# Altium footprint library FootPrintLib_1.PcbLib: 498 footprints (part 3 of 35)
Each footprint in its own frame and in the unit in brackets; x right, y up, seen from the top. Pads: shape width x height; smd on the part's side, far side on the other; paste and mask are expansions set on the pad; w line width, h text height; cw(c..) or ccw(c..) is an arc to the next point about the centre after c.
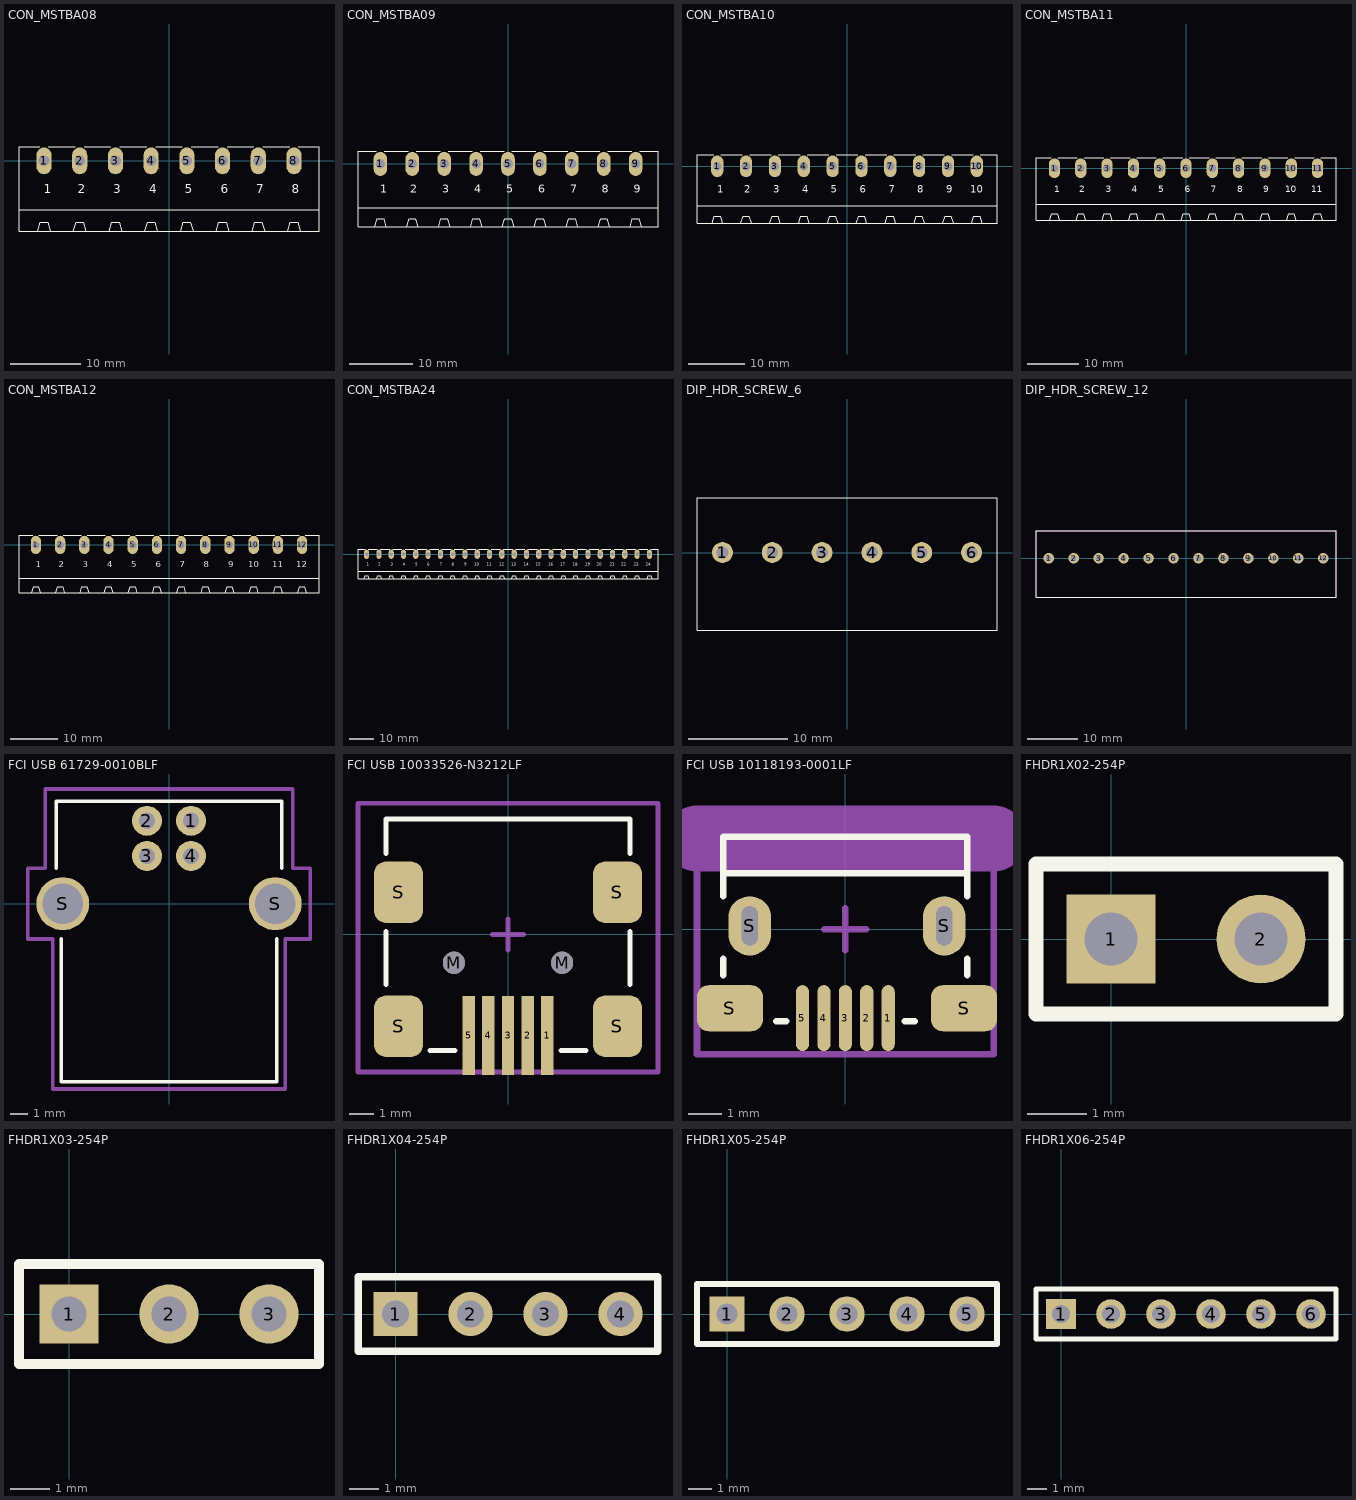
[diagram p2: the footprints below, top view; thin cyan lines are the x and y axes]

## CON_MSTBA08 [mil]
height 338.58
pads (8):
  oval 85x150 hole 60: 1(-700,0) 2(-500,0) 3(-300,0) 4(-100,0) 5(100,0) 6(300,0) 7(500,0) 8(700,0)
Top Overlay:
  lines w6: -725,80 -840,80 -840,-275 ; -675,80 -525,80 ; -475,80 -325,80 ; -275,80 -125,80 ; -75,80 75,80 ; 125,80 275,80 ; 325,80 475,80 ; 525,80 675,80 ; 725,80 840,80 840,-275 ; -840,-275 840,-275 ; -840,-275 -840,-395 -735,-395 ; -735,-395 -720,-345 -680,-345 -665,-395 ; -735,-395 -665,-395 ; -665,-395 -535,-395 ; -535,-395 -520,-345 -480,-345 -465,-395 ; -535,-395 -465,-395 ; -465,-395 -335,-395 ; -335,-395 -265,-395 ; -335,-395 -320,-345 -280,-345 -265,-395 ; -265,-395 -135,-395 ; -135,-395 -65,-395 ; -135,-395 -120,-345 -80,-345 -65,-395 ; -65,-395 65,-395 ; 65,-395 135,-395 ; 65,-395 80,-345 120,-345 135,-395 ; 135,-395 265,-395 ; 265,-395 335,-395 ; 265,-395 280,-345 320,-345 335,-395 ; 335,-395 465,-395 ; 465,-395 535,-395 ; 465,-395 480,-345 520,-345 535,-395 ; 535,-395 665,-395 ; 665,-395 735,-395 ; 665,-395 680,-345 720,-345 735,-395 ; 735,-395 840,-395 840,-275
  text "1" at -701.26,-182.48 h50
  text "2" at -511.26,-182.48 h50
  text "3" at -311.26,-182.48 h50
  text "4" at -111.26,-182.48 h50
  text "5" at 88.74,-182.48 h50
  text "6" at 288.74,-182.48 h50
  text "7" at 488.74,-182.48 h50
  text "8" at 688.74,-182.48 h50
3D body "MSTBA2.stp": height 339.58, standoff -136.8, extent -840,-392.44 -361.26,80.09
3D body "MSTBA3.stp": height 339.58, standoff -136.8, extent -440,-392.44 238.74,80.09
3D body "MSTBA3.stp": height 339.58, standoff -136.8, extent 160,-392.44 838.74,80.09

## CON_MSTBA09 [mil]
height 338.58
pads (9):
  oval 85x150 hole 60: 1(-800,0) 2(-600,0) 3(-400,0) 4(-200,0) 5(0,0) 6(200,0) 7(400,0) 8(600,0) 9(800,0)
Top Overlay:
  lines w6: -825,80 -940,80 -940,-275 ; -775,80 -625,80 ; -575,80 -425,80 ; -375,80 -225,80 ; -175,80 -25,80 ; 25,80 175,80 ; 225,80 375,80 ; 425,80 575,80 ; 625,80 775,80 ; 825,80 940,80 940,-275 ; -940,-275 940,-275 ; -940,-275 -940,-395 -835,-395 ; -835,-395 -820,-345 -780,-345 -765,-395 ; -835,-395 -765,-395 ; -765,-395 -635,-395 ; -635,-395 -620,-345 -580,-345 -565,-395 ; -635,-395 -565,-395 ; -565,-395 -435,-395 ; -435,-395 -365,-395 ; -435,-395 -420,-345 -380,-345 -365,-395 ; -365,-395 -235,-395 ; -235,-395 -165,-395 ; -235,-395 -220,-345 -180,-345 -165,-395 ; -165,-395 -35,-395 ; -35,-395 35,-395 ; -35,-395 -20,-345 20,-345 35,-395 ; 35,-395 165,-395 ; 165,-395 235,-395 ; 165,-395 180,-345 220,-345 235,-395 ; 235,-395 365,-395 ; 365,-395 435,-395 ; 365,-395 380,-345 420,-345 435,-395 ; 435,-395 565,-395 ; 565,-395 635,-395 ; 565,-395 580,-345 620,-345 635,-395 ; 635,-395 765,-395 ; 765,-395 835,-395 ; 765,-395 780,-345 820,-345 835,-395 ; 835,-395 940,-395 940,-275
  text "1" at -801.26,-182.48 h50
  text "2" at -611.26,-182.48 h50
  text "3" at -411.26,-182.48 h50
  text "4" at -211.26,-182.48 h50
  text "5" at -11.26,-182.48 h50
  text "6" at 188.74,-182.48 h50
  text "7" at 388.74,-182.48 h50
  text "8" at 588.74,-182.48 h50
  text "9" at 788.74,-182.48 h50
3D body "MSTBA3.stp": height 339.58, standoff -136.8, extent -940,-392.44 -261.26,80.09
3D body "MSTBA3.stp": height 339.58, standoff -136.8, extent -340,-392.44 338.74,80.09
3D body "MSTBA3.stp": height 339.58, standoff -136.8, extent 260,-392.44 938.74,80.09

## CON_MSTBA10 [mil]
height 338.58
pads (10):
  oval 85x150 hole 60: 1(-900,0) 2(-700,0) 3(-500,0) 4(-300,0) 5(-100,0) 6(100,0) 7(300,0) 8(500,0) 9(700,0) 10(900,0)
Top Overlay:
  lines w6: -925,80 -1040,80 -1040,-275 ; -875,80 -725,80 ; -675,80 -525,80 ; -475,80 -325,80 ; -275,80 -125,80 ; -75,80 75,80 ; 125,80 275,80 ; 325,80 475,80 ; 525,80 675,80 ; 725,80 875,80 ; 925,80 1040,80 1040,-275 ; -1040,-275 -1040,-395 -935,-395 ; -1040,-275 1040,-275 ; -935,-395 -865,-395 ; -935,-395 -920,-345 -880,-345 -865,-395 ; -865,-395 -735,-395 ; -735,-395 -665,-395 ; -735,-395 -720,-345 -680,-345 -665,-395 ; -665,-395 -535,-395 ; -535,-395 -520,-345 -480,-345 -465,-395 ; -535,-395 -465,-395 ; -465,-395 -335,-395 ; -335,-395 -320,-345 -280,-345 -265,-395 ; -335,-395 -265,-395 ; -265,-395 -135,-395 ; -135,-395 -120,-345 -80,-345 -65,-395 ; -135,-395 -65,-395 ; -65,-395 65,-395 ; 65,-395 80,-345 120,-345 135,-395 ; 65,-395 135,-395 ; 135,-395 265,-395 ; 265,-395 280,-345 320,-345 335,-395 ; 265,-395 335,-395 ; 335,-395 465,-395 ; 465,-395 480,-345 520,-345 535,-395 ; 465,-395 535,-395 ; 535,-395 665,-395 ; 665,-395 680,-345 720,-345 735,-395 ; 665,-395 735,-395 ; 735,-395 865,-395 ; 865,-395 880,-345 920,-345 935,-395 ; 865,-395 935,-395 ; 935,-395 1040,-395 1040,-275
  text "10" at 853.74,-182.48 h50
  text "9" at 688.74,-182.48 h50
  text "8" at 488.74,-182.48 h50
  text "7" at 288.74,-182.48 h50
  text "6" at 88.74,-182.48 h50
  text "5" at -111.26,-182.48 h50
  text "4" at -311.26,-182.48 h50
  text "3" at -511.26,-182.48 h50
  text "2" at -711.26,-182.48 h50
  text "1" at -901.26,-182.48 h50
3D body "MSTBA2.stp": height 339.58, standoff -136.8, extent -640,-392.44 -161.26,80.09
3D body "MSTBA2.stp": height 339.58, standoff -136.8, extent -1040,-392.44 -561.26,80.09
3D body "MSTBA3.stp": height 339.58, standoff -136.8, extent -240,-392.44 438.74,80.09
3D body "MSTBA3.stp": height 339.58, standoff -136.8, extent 360,-392.44 1038.74,80.09

## CON_MSTBA11 [mil]
height 338.58
pads (11):
  oval 85x150 hole 60: 1(-1000,0) 2(-800,0) 3(-600,0) 4(-400,0) 5(-200,0) 6(0,0) 7(200,0) 8(400,0) 9(600,0) 10(800,0) 11(1000,0)
Top Overlay:
  lines w6: -1025,80 -1140,80 -1140,-275 ; -975,80 -825,80 ; -775,80 -625,80 ; -575,80 -425,80 ; -375,80 -225,80 ; -175,80 -25,80 ; 25,80 175,80 ; 225,80 375,80 ; 425,80 575,80 ; 625,80 775,80 ; 825,80 975,80 ; 1025,80 1140,80 1140,-275 ; -1140,-275 -1140,-395 -1035,-395 ; -1140,-275 1140,-275 ; -1035,-395 -965,-395 ; -1035,-395 -1020,-345 -980,-345 -965,-395 ; -965,-395 -835,-395 ; -835,-395 -765,-395 ; -835,-395 -820,-345 -780,-345 -765,-395 ; -765,-395 -635,-395 ; -635,-395 -620,-345 -580,-345 -565,-395 ; -635,-395 -565,-395 ; -565,-395 -435,-395 ; -435,-395 -420,-345 -380,-345 -365,-395 ; -435,-395 -365,-395 ; -365,-395 -235,-395 ; -235,-395 -220,-345 -180,-345 -165,-395 ; -235,-395 -165,-395 ; -165,-395 -35,-395 ; -35,-395 -20,-345 20,-345 35,-395 ; -35,-395 35,-395 ; 35,-395 165,-395 ; 165,-395 180,-345 220,-345 235,-395 ; 165,-395 235,-395 ; 235,-395 365,-395 ; 365,-395 380,-345 420,-345 435,-395 ; 365,-395 435,-395 ; 435,-395 565,-395 ; 565,-395 580,-345 620,-345 635,-395 ; 565,-395 635,-395 ; 635,-395 765,-395 ; 765,-395 780,-345 820,-345 835,-395 ; 765,-395 835,-395 ; 835,-395 965,-395 ; 965,-395 980,-345 1020,-345 1035,-395 ; 965,-395 1035,-395 ; 1035,-395 1140,-395 1140,-275
  text "11" at 953.74,-182.48 h50
  text "10" at 753.74,-182.48 h50
  text "9" at 588.74,-182.48 h50
  text "8" at 388.74,-182.48 h50
  text "7" at 188.74,-182.48 h50
  text "6" at -11.26,-182.48 h50
  text "5" at -211.26,-182.48 h50
  text "4" at -411.26,-182.48 h50
  text "3" at -611.26,-182.48 h50
  text "2" at -811.26,-182.48 h50
  text "1" at -1001.26,-182.48 h50
3D body "MSTBA2.stp": height 339.58, standoff -136.8, extent -1140,-392.44 -661.26,80.09
3D body "MSTBA3.stp": height 339.58, standoff -136.8, extent -740,-392.44 -61.26,80.09
3D body "MSTBA3.stp": height 339.58, standoff -136.8, extent -140,-392.44 538.74,80.09
3D body "MSTBA3.stp": height 339.58, standoff -136.8, extent 460,-392.44 1138.74,80.09

## CON_MSTBA12 [mil]
height 338.58
pads (12):
  oval 85x150 hole 60: 1(-1100,0) 2(-900,0) 3(-700,0) 4(-500,0) 5(-300,0) 6(-100,0) 7(100,0) 8(300,0) 9(500,0) 10(700,0) 11(900,0) 12(1100,0)
Top Overlay:
  lines w6: -1125,80 -1240,80 -1240,-275 ; -1075,80 -925,80 ; -875,80 -725,80 ; -675,80 -525,80 ; -475,80 -325,80 ; -275,80 -125,80 ; -75,80 75,80 ; 125,80 275,80 ; 325,80 475,80 ; 525,80 675,80 ; 725,80 875,80 ; 925,80 1075,80 ; 1125,80 1240,80 1240,-275 ; -1240,-275 1240,-275 ; -1240,-275 -1240,-395 -1135,-395 ; -1135,-395 -1120,-345 -1080,-345 -1065,-395 ; -1135,-395 -1065,-395 ; -1065,-395 -935,-395 ; -935,-395 -920,-345 -880,-345 -865,-395 ; -935,-395 -865,-395 ; -865,-395 -735,-395 ; -735,-395 -665,-395 ; -735,-395 -720,-345 -680,-345 -665,-395 ; -665,-395 -535,-395 ; -535,-395 -465,-395 ; -535,-395 -520,-345 -480,-345 -465,-395 ; -465,-395 -335,-395 ; -335,-395 -265,-395 ; -335,-395 -320,-345 -280,-345 -265,-395 ; -265,-395 -135,-395 ; -135,-395 -65,-395 ; -135,-395 -120,-345 -80,-345 -65,-395 ; -65,-395 65,-395 ; 65,-395 135,-395 ; 65,-395 80,-345 120,-345 135,-395 ; 135,-395 265,-395 ; 265,-395 335,-395 ; 265,-395 280,-345 320,-345 335,-395 ; 335,-395 465,-395 ; 465,-395 535,-395 ; 465,-395 480,-345 520,-345 535,-395 ; 535,-395 665,-395 ; 665,-395 735,-395 ; 665,-395 680,-345 720,-345 735,-395 ; 735,-395 865,-395 ; 865,-395 935,-395 ; 865,-395 880,-345 920,-345 935,-395 ; 935,-395 1065,-395 ; 1065,-395 1135,-395 ; 1065,-395 1080,-345 1120,-345 1135,-395 ; 1135,-395 1240,-395 1240,-275
  text "1" at -1101.26,-182.48 h50
  text "2" at -911.26,-182.48 h50
  text "3" at -711.26,-182.48 h50
  text "4" at -511.26,-182.48 h50
  text "5" at -311.26,-182.48 h50
  text "6" at -111.26,-182.48 h50
  text "7" at 88.74,-182.48 h50
  text "8" at 288.74,-182.48 h50
  text "9" at 488.74,-182.48 h50
  text "10" at 653.74,-182.48 h50
  text "11" at 853.74,-182.48 h50
  text "12" at 1053.74,-182.48 h50
3D body "MSTBA3.stp": height 339.58, standoff -136.8, extent 560,-392.44 1238.74,80.09
3D body "MSTBA3.stp": height 339.58, standoff -136.8, extent -40,-392.44 638.74,80.09
3D body "MSTBA3.stp": height 339.58, standoff -136.8, extent -640,-392.44 38.74,80.09
3D body "MSTBA3.stp": height 339.58, standoff -136.8, extent -1240,-392.44 -561.26,80.09

## CON_MSTBA24 [mil]
height 338.58
pads (24):
  oval 85x150 hole 60: 1(-2300,0) 2(-2100,0) 3(-1900,0) 4(-1700,0) 5(-1500,0) 6(-1300,0) 7(-1100,0) 8(-900,0) 9(-700,0) 10(-500,0) 11(-300,0) 12(-100,0) 13(100,0) 14(300,0) 15(500,0) 16(700,0) 17(900,0) 18(1100,0) 19(1300,0) 20(1500,0) 21(1700,0) 22(1900,0) 23(2100,0) 24(2300,0)
Top Overlay:
  drawing of 151 lines, arcs and shapes, not listed
  text "1" at -2301.26,-182.48 h50
  text "2" at -2111.26,-182.48 h50
  text "3" at -1911.26,-182.48 h50
  text "4" at -1711.26,-182.48 h50
  text "5" at -1511.26,-182.48 h50
  text "6" at -1311.26,-182.48 h50
  text "7" at -1111.26,-182.48 h50
  text "8" at -911.26,-182.48 h50
  text "9" at -711.26,-182.48 h50
  text "10" at -546.26,-182.48 h50
  text "11" at -346.26,-182.48 h50
  text "12" at -146.26,-182.48 h50
  text "13" at 53.74,-182.48 h50
  text "14" at 253.74,-182.48 h50
  text "15" at 453.74,-182.48 h50
  text "16" at 653.74,-182.48 h50
  text "17" at 853.74,-182.48 h50
  text "18" at 1053.74,-182.48 h50
  text "19" at 1253.74,-182.48 h50
  text "20" at 1443.74,-182.48 h50
  text "21" at 1653.74,-182.48 h50
  text "22" at 1843.74,-182.48 h50
  text "23" at 2043.74,-182.48 h50
  text "24" at 2243.74,-182.48 h50
3D body "MSTBA 2,5 24-G-5,08 - 1757268.stp": height 339.58, standoff -136.8, extent -2440,-392.44 2438.74,80.09

## DIP_HDR_SCREW_6 [mm] "KMRJ103-5-508-6"
pads (6):
  round 2.1 hole 1.2: 1(-12.5,0) 2(-7.5,0) 3(-2.5,0) 4(2.5,0) 5(7.5,0) 6(12.5,0)
Top Overlay:
  lines w0.1: -15.05,-7.8 15.05,-7.8 15.05,5.5 -15.05,5.5 -15.05,-7.8
3D body "60s35.stp": height 15.3, standoff -3.5, extent -15.835,-6.404 14.906,6.996

## DIP_HDR_SCREW_12 [mm] "KMRJ103-5-508-12"
pads (12):
  round 2.1 hole 1.2: 1(-27.5,0) 2(-22.5,0) 3(-17.5,0) 4(-12.5,0) 5(-7.5,0) 6(-2.5,0) 7(2.5,0) 8(7.5,0) 9(12.5,0) 10(17.5,0) 11(22.5,0) 12(27.5,0)
Top Overlay:
  lines w0.1: -30.05,-7.8 -30.05,5.5 30.05,5.5 30.05,-7.8 -30.05,-7.8
Mechanical 13:
  lines w0.1: -30.05,-7.8 -30.05,5.5 30.05,5.5 30.05,-7.8 -30.05,-7.8
3D body "12pos35.stp": height 15.3, standoff -3.5, extent -30.701,-6.401 30.04,6.999

## FCI USB 61729-0010BLF [mm]
height 11
pads (6):
  round 1.7 hole 0.92: 1(1.25,4.7) 2(-1.25,4.7) 3(-1.25,2.71) 4(1.25,2.71)
  round 3 hole 2.3: S(-6.02,0) S(6.02,0)
Top Overlay:
  lines w0.2: -6.4,2 -6.4,5.8 6.4,5.8 6.4,2 ; -6.1,-2 -6.1,-10.1 6.1,-10.1 6.1,-2
Mechanical 15:
  lines w0.2: -8,-2 -8,2 -7,2 -7,6.5 0,6.5 7,6.5 7,2 8,2 8,-2 6.6,-2 6.6,-10.5 0,-10.5 -6.6,-10.5 -6.6,-2 -8,-2
3D body "FCI 61729-0010BLF.STEP": height 11, standoff -2.8, extent -6.56,-10.175 6.56,5.765

## FCI USB 10033526-N3212LF [mm] "USB 2.0 Type B Mini"
height 3.95
pads (11):
  rect 0.5x3.2 smd: 1(1.6,-4.1) 2(0.8,-4.1) 3(0,-4.1) 4(-0.8,-4.1) 5(-1.6,-4.1)
  round 0.9 hole 0.9 unplated: M(-2.2,-1.151) M(2.2,-1.151)
  rrect50% 2x2.5 smd: S(-4.45,-3.731) S(-4.45,1.719) S(4.45,-3.731) S(4.45,1.719)
Top Overlay:
  lines w0.2: -4.953,-2.04 -4.953,0.119 ; -4.953,3.294 -4.953,4.691 4.953,4.691 4.953,3.294 ; -3.175,-4.707 -2.159,-4.707 ; 2.159,-4.707 3.175,-4.707 ; 4.953,-2.04 4.953,0.119
Mechanical 15:
  lines w0.2: -0.635,0 0.635,0 ; 0,-0.635 0,0.635 ; -6.096,-5.588 -6.096,5.334 6.096,5.334 6.096,-5.588 -6.096,-5.588
3D body "FCI USB 10033526-N3212LF.STEP": height 4.01, standoff -0.99, extent -4.95,-4.701 4.95,4.699

## FCI USB 10118193-0001LF [mm] "USB 2.0 Type B Micro"
height 3.1
pads (9):
  oval 0.4x2 smd: 1(1.3,-2.7) 2(0.65,-2.7) 3(0,-2.7) 4(-0.65,-2.7) 5(-1.3,-2.7)
  rrect50% 2x1.4 smd: S(-3.5,-2.4) S(3.6,-2.4)
  oval 1.3x1.8 hole 0.5 slot 1.2 at 90 deg: S(-2.9,0.1) S(3,0.1)
Top Overlay:
  lines w0.2: -3.7,-1.4 -3.7,-0.9 ; -3.7,1 -3.7,1.7 ; -2.1,-2.8 -1.8,-2.8 ; 1.8,-2.8 2.1,-2.8 ; 3.7,-1.4 3.7,-0.9 ; 3.7,1 3.7,1.7 ; -3.7,1.7 3.7,1.7 ; -3.7,1.7 -3.7,2.8 3.7,2.8 3.7,1.7
Mechanical 15:
  lines w0.2: -0.635,0 0.635,0 ; 0,-0.635 0,0.635 ; -4.5,-3.8 -4.5,3.2 4.5,3.2 4.5,-3.8 -4.5,-3.8
Mechanical 31:
  lines w2: -4.5,2.754 0,2.754 4.5,2.754
3D body "FCI USB 10118193-0001lfc.STEP": height 2.78, standoff -0.82, extent -3.929,-2.9 3.928,2.76

## FHDR1X02-254P [mm] "Female Header 1X02 with 2.54 mm Pitch"
pads (2):
  rect 1.5x1.5 hole 0.9: 1(0,0)
  round 1.5 hole 0.9: 2(2.54,0)
Top Overlay:
  lines w0.254: -1.27,-1.27 -1.27,1.27 3.81,1.27 3.81,-1.27 -1.27,-1.27

## FHDR1X03-254P [mm] "Female Header 1X03 with 2.54 mm Pitch"
pads (3):
  rect 1.5x1.5 hole 0.9: 1(0,0)
  round 1.5 hole 0.9: 2(2.54,0) 3(5.08,0)
Top Overlay:
  lines w0.254: -1.27,-1.27 -1.27,1.27 6.35,1.27 6.35,-1.27 -1.27,-1.27

## FHDR1X04-254P [mm] "Female Header 1X04 with 2.54 mm Pitch"
pads (4):
  rect 1.5x1.5 hole 0.9: 1(0,0)
  round 1.5 hole 0.9: 2(2.54,0) 3(5.08,0) 4(7.62,0)
Top Overlay:
  lines w0.254: -1.27,-1.27 8.89,-1.27 8.89,1.27 -1.27,1.27 -1.27,-1.27

## FHDR1X05-254P [mm] "Female Header 1X05 with 2.54 mm Pitch"
pads (5):
  rect 1.5x1.5 hole 0.9: 1(0,0)
  round 1.5 hole 0.9: 2(2.54,0) 3(5.08,0) 4(7.62,0) 5(10.16,0)
Top Overlay:
  lines w0.254: -1.27,-1.27 11.43,-1.27 11.43,1.27 -1.27,1.27 -1.27,-1.27

## FHDR1X06-254P [mm] "Female Header 1X06 with 2.54 mm Pitch"
pads (6):
  rect 1.5x1.5 hole 0.9: 1(0,0)
  round 1.5 hole 0.9: 2(2.54,0) 3(5.08,0) 4(7.62,0) 5(10.16,0) 6(12.7,0)
Top Overlay:
  lines w0.254: -1.27,-1.27 13.97,-1.27 13.97,1.27 -1.27,1.27 -1.27,-1.27